# EAGLE library part UMX4N (library madhu)
Rohm High transition frequency (dual transistors) Marking X4 Two 2SC3837K chips in a EMT or UMT or SMT package. High transition frequency. (fT=1.5GHz) Low output capacitance. (Cob=0.95pF)
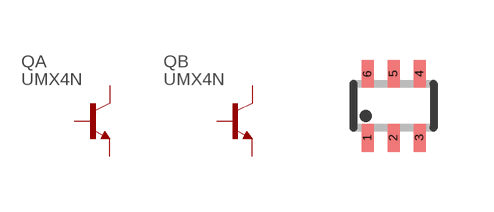
[diagram p48: symbol with the pads of SC88; footprint SC88]

Designator prefix Q; gates A=NPN B=NPN

## UMX4NTR  [SC88]
1  B:E  pas
2  B:B  pas
3  A:B  pas
4  A:C  pas
5  A:E  pas
6  B:C  pas

## Footprint SC88 (pad centres in mm)
Small Outline Transistor; 6 leads Reflow soldering INFINEON, www.infineon.com/cmc_upload/0/000/010/257/eh_db_5b.pdf
smd 0.3 x 0.7: 1 -0.65,-0.8; 2 0,-0.8; 3 0.65,-0.8; 4 0.65,0.8; 5 0,0.8; 6 -0.65,0.8